# Altium integrated library AP64350QSP-13.IntLib: 1 symbol
Pins are listed as number, name and electrical type; pins without a type are passive.

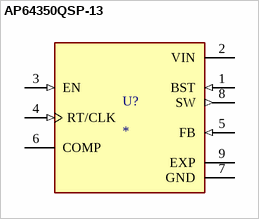
[diagram p0: symbol AP64350QSP-13]

## AP64350QSP-13
designator U?
Buck Switching Regulator IC Positive Adjustable 0.8V 1 Output 3.5A 8-SOIC (0.154, 3.90mm Width) Exposed Pad; MF: Diodes Incorporated; MP: AP64350QSP13; SnapEDA_Link: https://www.snapeda.com/parts/AP64350QSP13/Diodes+Inc./view-part/?ref=snap; Package: None; Value: *; Check_prices: https://www.snapeda.com/parts/AP64350QSP13/Diodes+Inc./view-part/?ref=eda
footprint IC_AP64350QSP-13
pins: 1 BST (in), 2 VIN (power), 3 EN (in), 4 RT/CLK (in), 5 FB (in), 6 COMP, 7 GND (power), 8 SW (out), 9 EXP